# Altium schematic symbol library MY_LIB_Switches_IEC.SchLib: 1 symbol
Pins are listed as number, name and electrical type; pins without a type are passive.

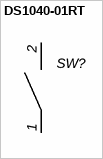
[diagram p0: symbol DS1040-01RT]

## DS1040-01RT
designator SW?  (value not drawn)
CONNFLY single-position piano DIP switch; SPST; 2 through-hole terminals; red housing; Manufacturer: CONNFLY; MPN: DS1040-01RT; Datasheet: https://www.connfly.com/static/upload/file/pdf/DS1040.pdf
pins: 1, 2